# EAGLE library part 101D-TAAB-R01 (library 101D-TAAB-R01)
Connector: for cards; Compact Flash; SMT; gold flash; LCP; 40m Source: Datasheet <https://cdn.ozdisan.com/ETicaret_Dosya/585481_4595843.PDF>
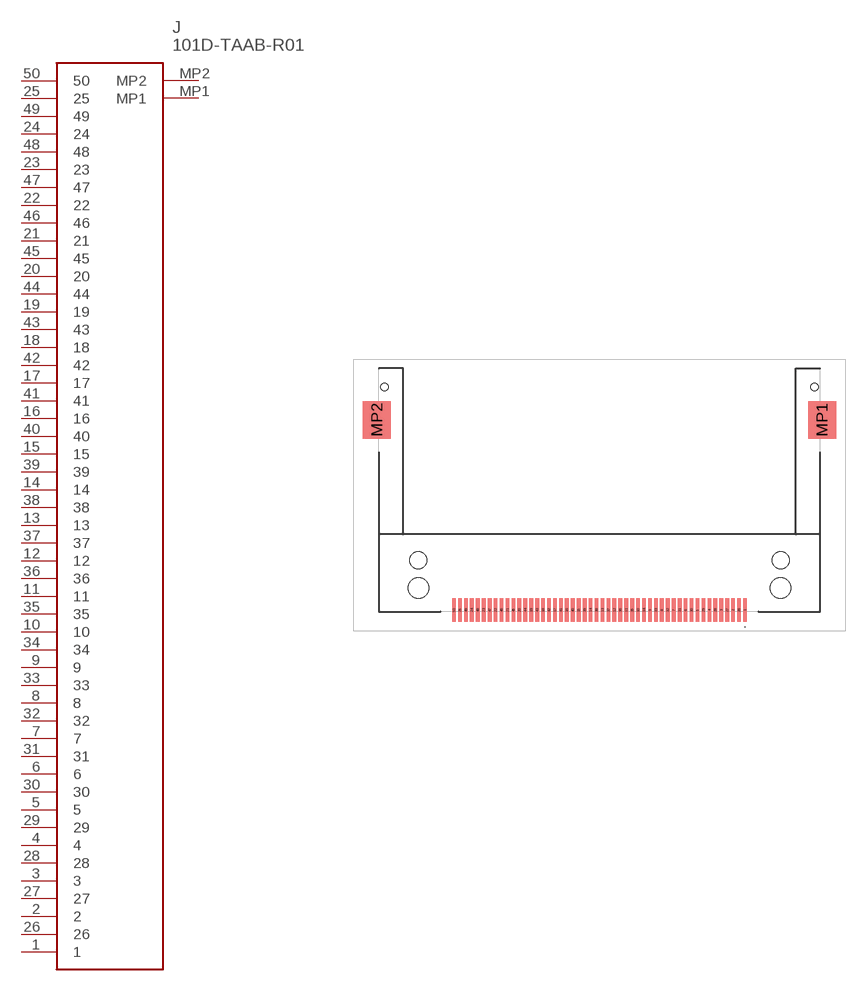
[diagram p0: symbol with the pads of 101DTAABR01; footprint 101DTAABR01]

Designator prefix J

## 101D-TAAB-R01 (Description: Connector: for cards; Compact Flash; SMT; gold flash; LCP; 40m; Height: 4.05mm; Manufacturer_Name: ATTEND; Manufacturer_Part_Number: 101D-TAAB-R01)  [101DTAABR01]
1  1
2  2
3  3
4  4
5  5
6  6
7  7
8  8
9  9
10  10
11  11
12  12
13  13
14  14
15  15
16  16
17  17
18  18
19  19
20  20
21  21
22  22
23  23
24  24
25  25
26  26
27  27
28  28
29  29
30  30
31  31
32  32
33  33
34  34
35  35
36  36
37  37
38  38
39  39
40  40
41  41
42  42
43  43
44  44
45  45
46  46
47  47
48  48
49  49
50  50
MP1  MP1
MP2  MP2

## Footprint 101DTAABR01 (pad centres in mm)
101D-TAAB-R01-8
smd 0.4 x 2.5: 1 15.558,-12.85; 2 14.288,-12.85; 3 13.018,-12.85; 4 11.748,-12.85; 5 10.478,-12.85; 6 9.208,-12.85; 7 7.938,-12.85; 8 6.668,-12.85; 9 5.398,-12.85; 10 4.128,-12.85; 11 2.858,-12.85; 12 1.588,-12.85; 13 0.318,-12.85; 14 -0.953,-12.85; 15 -2.223,-12.85; 16 -3.492,-12.85; 17 -4.762,-12.85; 18 -6.032,-12.85; 19 -7.302,-12.85; 20 -8.572,-12.85; 21 -9.842,-12.85; 22 -11.113,-12.85; 23 -12.383,-12.85; 24 -13.652,-12.85; 25 -14.922,-12.85; 26 14.923,-12.85; 27 13.653,-12.85; 28 12.383,-12.85; 29 11.113,-12.85; 30 9.843,-12.85; 31 8.573,-12.85; 32 7.303,-12.85; 33 6.033,-12.85; 34 4.763,-12.85; 35 3.493,-12.85; 36 2.223,-12.85; 37 0.953,-12.85; 38 -0.317,-12.85; 39 -1.587,-12.85; 40 -2.857,-12.85; 41 -4.127,-12.85; 42 -5.398,-12.85; 43 -6.668,-12.85; 44 -7.938,-12.85; 45 -9.207,-12.85; 46 -10.477,-12.85; 47 -11.747,-12.85; 48 -13.017,-12.85; 49 -14.287,-12.85; 50 -15.558,-12.85
smd 3 x 4: MP1 23.8,7.5; MP2 -23.8,7.5
hole 2.2 at 19.37,-10.5
hole 1.8 at 19.37,-7.5
hole 2.2 at -19.37,-10.5
hole 1.8 at -19.37,-7.5
hole 0.8 at 23,11
hole 0.8 at -23,11